# EAGLE library part NPM1300-QEAA-R (library card_samac_3d)
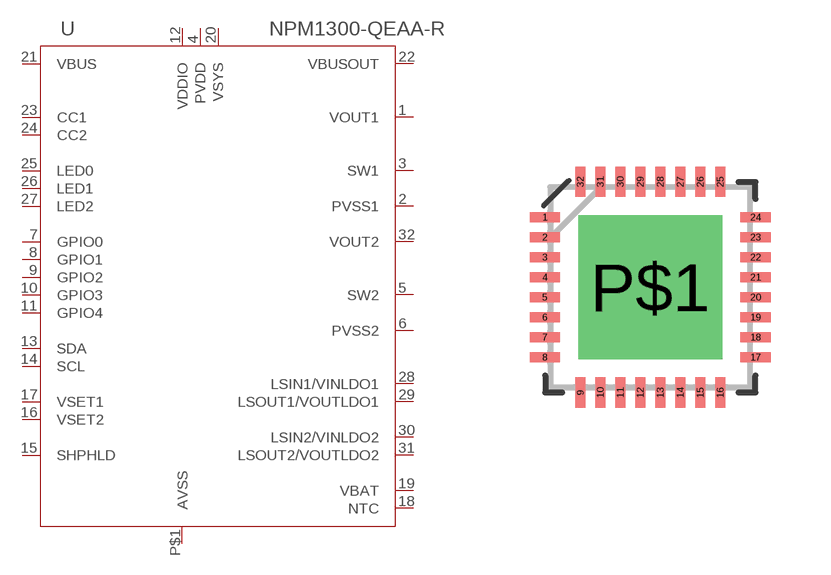
[diagram p5: symbol with the pads of QFN32_5X5_NOR; footprint QFN32_5X5_NOR]

Designator prefix U

## NPM1300-QEAA-RQFN32_5X5_NOR  [QFN32_5X5_NOR]
1  VOUT1  pwr
2  PVSS1  pas
3  SW1  pwr
4  PVDD  pwr
5  SW2  pwr
6  PVSS2  pas
7  GPIO0
8  GPIO1
9  GPIO2
10  GPIO3
11  GPIO4
12  VDDIO  pwr
13  SDA
14  SCL  in
15  SHPHLD  in
16  VSET2  pas
17  VSET1  pas
18  NTC  pas
19  VBAT  pwr
20  VSYS  pwr
21  VBUS  pwr
22  VBUSOUT  pas
23  CC1  pas
24  CC2  pas
25  LED0  pas
26  LED1  pas
27  LED2  pas
28  LSIN1/VINLDO1  pwr
29  LSOUT1/VOUTLDO1  pwr
30  LSIN2/VINLDO2  pwr
31  LSOUT2/VOUTLDO2  pwr
32  VOUT2  pwr
P$1  AVSS  pas

## Footprint QFN32_5X5_NOR (pad centres in mm)
smd 0.762 x 0.254: 1 -2.636,1.75; 2 -2.636,1.25; 3 -2.636,0.75; 4 -2.636,0.25; 5 -2.636,-0.25; 6 -2.636,-0.75; 7 -2.636,-1.25; 8 -2.636,-1.75; 17 2.636,-1.75; 18 2.636,-1.25; 19 2.636,-0.75; 20 2.636,-0.25; 21 2.636,0.25; 22 2.636,0.75; 23 2.636,1.25; 24 2.636,1.75
smd 0.254 x 0.762: 9 -1.75,-2.636; 10 -1.25,-2.636; 11 -0.75,-2.636; 12 -0.25,-2.636; 13 0.25,-2.636; 14 0.75,-2.636; 15 1.25,-2.636; 16 1.75,-2.636; 25 1.75,2.636; 26 1.25,2.636; 27 0.75,2.636; 28 0.25,2.636; 29 -0.25,2.636; 30 -0.75,2.636; 31 -1.25,2.636; 32 -1.75,2.636
drill 2 pad 3.6 square: P$1 0,0